# Altium footprint library 24V转15V芯片_URA2415S-6WR3.PcbLib: 1 footprints
Each footprint in its own frame and in the unit in brackets; x right, y up, seen from the top. Pads: shape width x height; smd on the part's side, far side on the other; paste and mask are expansions set on the pad; w line width, h text height; cw(c..) or ccw(c..) is an arc to the next point about the centre after c.
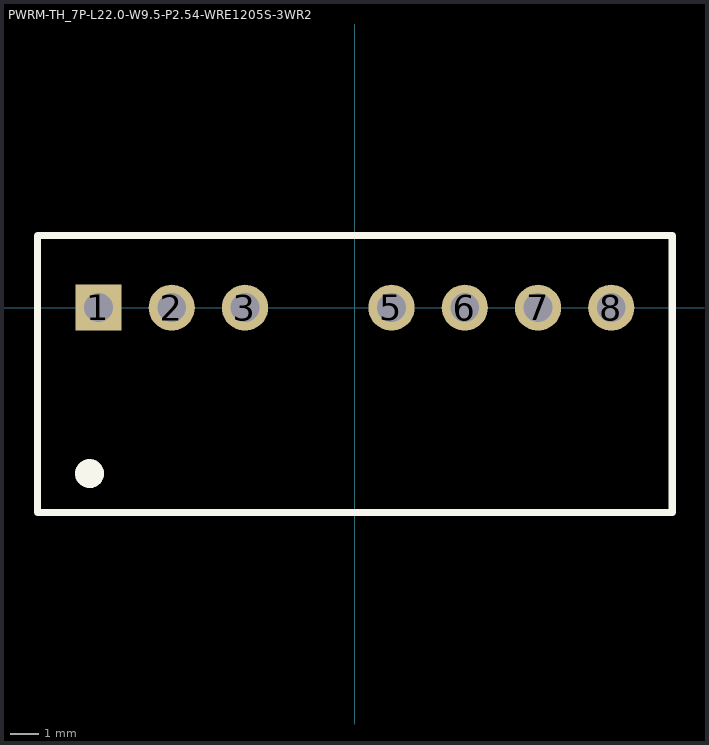
[diagram p0: the footprint, top view; thin cyan lines are the x and y axes]

## PWRM-TH_7P-L22.0-W9.5-P2.54-WRE1205S-3WR2 [mm]
pads (7):
  rect 1.6x1.6 hole 1 paste-2539.97 mask+0.05: 1(-8.89,0)
  round 1.6 hole 1 paste-2539.97 mask+0.05: 2(-6.35,0)
  round 1.6 hole 1 copper offset 0,0 paste-2539.97 mask+0.05: 3(-3.81,0) 5(1.27,0) 6(3.81,0) 7(6.35,0) 8(8.89,0)
Top Overlay:
  circle w0.5: c-9.2,-5.75 r0.25
  lines w0.254: -11,-7.1 11,-7.1 11,2.5 -11,2.5 -11,-7.1
Mechanical 2:
  circle w0.5: c-9.2,-5.75 r0.25
Mechanical 6:
  lines w0.051: -11,-7 11,-7 11,2.5 -11,2.5 -11,-7
Mechanical 8:
  region: -10.94,-7 -10.94,-7.025 -10.975,-7.06 -11.025,-7.06 -11.06,-7.025 -11.06,-7 -11.06,-6.975 -11.025,-6.94 -10.975,-6.94 -10.94,-6.975 -10.94,-7
Mechanical 9:
  region: 8.64,-0.15 8.64,0.15 9.14,0.15 9.14,-0.15
  region: 6.1,-0.15 6.1,0.15 6.6,0.15 6.6,-0.15
  region: 3.56,-0.15 3.56,0.15 4.06,0.15 4.06,-0.15
  region: 1.02,-0.15 1.02,0.15 1.52,0.15 1.52,-0.15
  region: -4.06,-0.15 -4.06,0.15 -3.56,0.15 -3.56,-0.15
  region: -6.6,-0.15 -6.6,0.15 -6.1,0.15 -6.1,-0.15
  region: -9.14,0.15 -8.64,0.15 -8.64,-0.15 -9.14,-0.15